# EAGLE library part CN3767 (library biogas_v2)
Cargador PWM para plomo-ácido de 12 V con MPPT (Consonance CN3767)
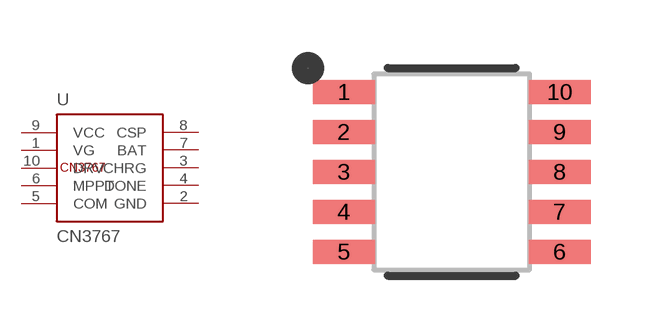
[diagram p0: symbol with the pads of SSOP10-1.0; footprint SSOP10-1.0]

Designator prefix U

## CN3767  [SSOP10-1.0]
1  VG  pas
2  GND  pas
3  CHRG  pas
4  DONE  pas
5  COM  pas
6  MPPT  pas
7  BAT  pas
8  CSP  pas
9  VCC  pas
10  DRV  pas

## Footprint SSOP10-1.0 (pad centres in mm)
SSOP-10 paso 1.0 mm (CN3767, Consonance). Cuerpo 4.9 x 3.9 mm.
smd 1.55 x 0.6: 1 -2.7,2; 2 -2.7,1; 3 -2.7,0; 4 -2.7,-1; 5 -2.7,-2; 6 2.7,-2; 7 2.7,-1; 8 2.7,0; 9 2.7,1; 10 2.7,2